# Altium schematic symbol library 机械件.SchLib: 1 symbol
Pins are listed as number, name and electrical type; pins without a type are passive.

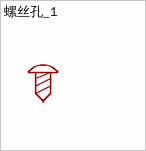
[diagram p0: symbol 螺丝孔_1]

## 螺丝孔_1
designator *?  (value not drawn)
footprint M3螺丝
pins: 1